# Altium footprint library FootPrintLib_1.PcbLib: 498 footprints (part 2 of 35)
Each footprint in its own frame and in the unit in brackets; x right, y up, seen from the top. Pads: shape width x height; smd on the part's side, far side on the other; paste and mask are expansions set on the pad; w line width, h text height; cw(c..) or ccw(c..) is an arc to the next point about the centre after c.
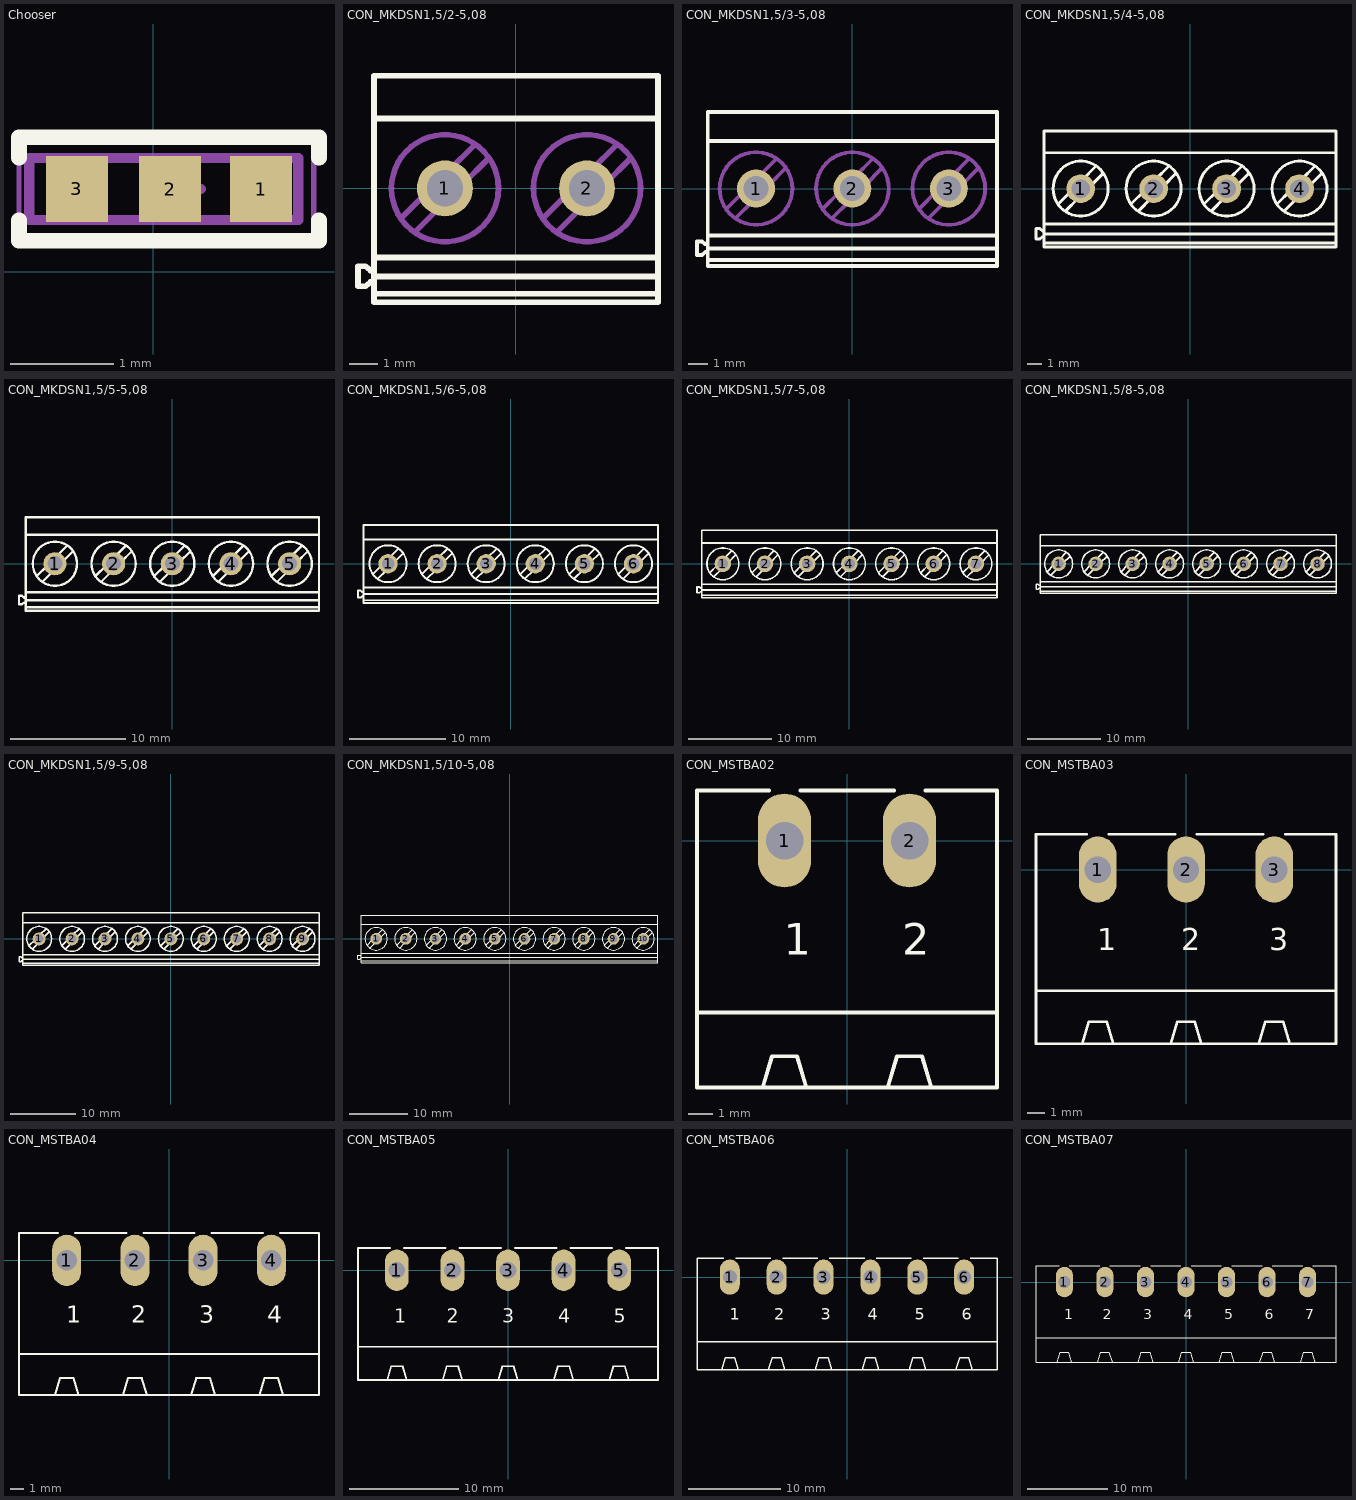
[diagram p1: the footprints below, top view; thin cyan lines are the x and y axes]

## Chooser [mm] "Connector; Header; 2 Position"
height 1.75
pads (3):
  rect 0.6x0.64 smd: 1(1.04,0.8) 2(0.16,0.8) 3(-0.74,0.8)
Top Overlay:
  lines w0.15: -1.3,0.5 -1.3,0.3 1.6,0.3 1.6,0.5 ; -1.3,1.1 -1.3,1.3 1.6,1.3 1.6,1.1
Mechanical 13:
  lines w0.1: -1.2,0.5 -1.2,1.1 1.4,1.1 1.4,0.5 -1.2,0.5
Mechanical 15:
  lines w0.05: -1.3,0.3 -1.3,1.3 1.55,1.3 1.55,0.3 -1.3,0.3
  lines w0.1: -0.06,0.8 0.46,0.8 ; 0.2,0.54 0.2,1.06
3D body "0402 cap.STEP": height 0.52, standoff 0, extent 0.1,0.538 1.1,1.062

## CON_MKDSN1,5/2-5,08 [mm]
pads (2):
  round 2 hole 1.3: 1(-2.54,0) 2(2.54,0)
Top Overlay:
  lines w0.203: -5.08,-3.775 -5.08,-3.352 ; -5.08,-3.775 5.08,-3.775 ; -5.08,-3.775 -5.08,-4.075 5.08,-4.075 5.08,-3.775 ; -5.08,-3.352 -5.209,-3.352 -5.387,-3.502 -5.65,-3.502 -5.65,-2.788 -5.387,-2.788 -5.209,-2.938 -5.08,-2.938 ; -5.08,-3.352 -5.08,-3.153 ; -5.08,-3.153 -5.08,-2.938 ; -5.08,-3.153 5.08,-3.153 ; -5.08,-2.938 -5.08,-2.473 ; -5.08,-2.473 -5.08,-1.98 -5.08,2.016 -5.08,2.499 ; -5.08,-2.473 5.08,-2.473 ; -5.08,2.499 5.08,2.499 ; -5.08,2.499 -5.08,4.025 5.08,4.025 5.08,2.499 ; 5.08,-3.775 5.08,-3.153 ; 5.08,-3.153 5.08,-2.473 ; 5.08,-2.473 5.08,-1.98 5.08,2.016 5.08,2.499
Mechanical 2:
  circle w0.203: c-2.54,0 r1.915
  circle w0.203: c2.54,0 r1.915
  lines w0.203: -4.108,-1.073 -3.179,-0.144 ; -3.613,-1.568 -2.7,-0.655 ; -1.467,1.568 -2.421,0.614 ; -0.972,1.073 -1.91,0.135 ; 0.972,-1.073 1.901,-0.144 ; 1.467,-1.568 2.38,-0.655 ; 3.613,1.568 2.659,0.614 ; 4.108,1.073 3.17,0.135 ; -3.179,-0.144 ccw(c-2.54,-0.025) -2.7,-0.655 ; -3.179,-0.144 -2.54,0.495 -2.421,0.614 ; -2.7,-0.655 -2.54,-0.495 -1.91,0.135 ; -2.421,0.614 cw(c-2.54,-0.025) -1.91,0.135 ; 1.901,-0.144 ccw(c2.54,-0.025) 2.38,-0.655 ; 1.901,-0.144 2.54,0.495 2.659,0.614 ; 2.38,-0.655 2.54,-0.495 3.17,0.135 ; 2.659,0.614 cw(c2.54,-0.025) 3.17,0.135
3D body "MKDSN2.stp": height 10.03, standoff -3.47, extent -5.643,-4.052 5.087,4.048

## CON_MKDSN1,5/3-5,08 [mm]
pads (3):
  round 2 hole 1.3: 1(-5.08,0) 2(0,0) 3(5.08,0)
Top Overlay:
  lines w0.203: -7.62,-3.775 -7.62,-3.352 ; -7.62,-3.775 7.62,-3.775 ; -7.62,-3.775 -7.62,-4.075 7.62,-4.075 7.62,-3.775 ; -7.62,-3.352 -7.749,-3.352 -7.927,-3.502 -8.19,-3.502 -8.19,-2.788 -7.927,-2.788 -7.749,-2.938 -7.62,-2.938 ; -7.62,-3.352 -7.62,-3.153 ; -7.62,-3.153 -7.62,-2.938 ; -7.62,-3.153 7.62,-3.153 ; -7.62,-2.938 -7.62,-2.473 ; -7.62,-2.473 -7.62,-1.98 -7.62,2.016 -7.62,2.499 ; -7.62,-2.473 7.62,-2.473 ; -7.62,2.499 7.62,2.499 ; -7.62,2.499 -7.62,4.025 7.62,4.025 7.62,2.499 ; 7.62,-3.775 7.62,-3.153 ; 7.62,-3.153 7.62,-2.473 ; 7.62,-2.473 7.62,-1.98 7.62,2.016 7.62,2.499
Mechanical 2:
  circle w0.203: c-5.08,0 r1.915
  circle w0.203: c0,0 r1.915
  circle w0.203: c5.08,0 r1.915
  lines w0.203: -6.648,-1.073 -5.719,-0.144 ; -6.153,-1.568 -5.24,-0.655 ; -4.007,1.568 -4.961,0.614 ; -3.512,1.073 -4.45,0.135 ; -1.568,-1.073 -0.639,-0.144 ; -1.073,-1.568 -0.16,-0.655 ; 1.073,1.568 0.119,0.614 ; 1.568,1.073 0.63,0.135 ; 3.512,-1.073 4.441,-0.144 ; 4.007,-1.568 4.92,-0.655 ; 6.153,1.568 5.199,0.614 ; 6.648,1.073 5.71,0.135 ; -5.719,-0.144 ccw(c-5.08,-0.025) -5.24,-0.655 ; -5.719,-0.144 -5.08,0.495 -4.961,0.614 ; -5.24,-0.655 -5.08,-0.495 -4.45,0.135 ; -4.961,0.614 cw(c-5.08,-0.025) -4.45,0.135 ; -0.639,-0.144 ccw(c0,-0.025) -0.16,-0.655 ; -0.639,-0.144 0,0.495 0.119,0.614 ; -0.16,-0.655 0,-0.495 0.63,0.135 ; 0.119,0.614 cw(c0,-0.025) 0.63,0.135 ; 4.441,-0.144 ccw(c5.08,-0.025) 4.92,-0.655 ; 4.441,-0.144 5.08,0.495 5.199,0.614 ; 4.92,-0.655 5.08,-0.495 5.71,0.135 ; 5.199,0.614 cw(c5.08,-0.025) 5.71,0.135
3D body "MKDSN3.stp": height 10.03, standoff -3.47, extent -8.19,-4.075 7.62,4.025

## CON_MKDSN1,5/4-5,08 [mm]
pads (4):
  round 2 hole 1.3: 1(-7.62,0) 2(-2.54,0) 3(2.54,0) 4(7.62,0)
Top Overlay:
  circle w0.203: c-7.62,0 r1.915
  circle w0.203: c-2.54,0 r1.915
  circle w0.203: c2.54,0 r1.915
  circle w0.203: c7.62,0 r1.915
  lines w0.203: -9.188,-1.073 -8.259,-0.144 ; -8.693,-1.568 -7.78,-0.655 ; -6.547,1.568 -7.501,0.614 ; -6.052,1.073 -6.99,0.135 ; -4.108,-1.073 -3.179,-0.144 ; -3.613,-1.568 -2.7,-0.655 ; -1.467,1.568 -2.421,0.614 ; -0.972,1.073 -1.91,0.135 ; 0.972,-1.073 1.901,-0.144 ; 1.467,-1.568 2.38,-0.655 ; 3.613,1.568 2.659,0.614 ; 4.108,1.073 3.17,0.135 ; 6.052,-1.073 6.981,-0.144 ; 6.547,-1.568 7.46,-0.655 ; 8.693,1.568 7.739,0.614 ; 9.188,1.073 8.25,0.135 ; -10.16,-3.775 -10.16,-3.352 ; -10.16,-3.775 10.16,-3.775 ; -10.16,-3.775 -10.16,-4.075 10.16,-4.075 10.16,-3.775 ; -10.16,-3.352 -10.289,-3.352 -10.467,-3.502 -10.73,-3.502 -10.73,-2.788 -10.467,-2.788 -10.289,-2.938 -10.16,-2.938 ; -10.16,-3.352 -10.16,-3.153 ; -10.16,-3.153 -10.16,-2.938 ; -10.16,-3.153 10.16,-3.153 ; -10.16,-2.938 -10.16,-2.473 ; -10.16,-2.473 -10.16,-1.98 -10.16,2.016 -10.16,2.499 ; -10.16,-2.473 10.16,-2.473 ; -10.16,2.499 10.16,2.499 ; -10.16,2.499 -10.16,4.025 10.16,4.025 10.16,2.499 ; -8.259,-0.144 ccw(c-7.62,-0.025) -7.78,-0.655 ; -8.259,-0.144 -7.62,0.495 -7.501,0.614 ; -7.78,-0.655 -7.62,-0.495 -6.99,0.135 ; -7.501,0.614 cw(c-7.62,-0.025) -6.99,0.135 ; -3.179,-0.144 ccw(c-2.54,-0.025) -2.7,-0.655 ; -3.179,-0.144 -2.54,0.495 -2.421,0.614 ; -2.7,-0.655 -2.54,-0.495 -1.91,0.135 ; -2.421,0.614 cw(c-2.54,-0.025) -1.91,0.135 ; 1.901,-0.144 ccw(c2.54,-0.025) 2.38,-0.655 ; 1.901,-0.144 2.54,0.495 2.659,0.614 ; 2.38,-0.655 2.54,-0.495 3.17,0.135 ; 2.659,0.614 cw(c2.54,-0.025) 3.17,0.135 ; 6.981,-0.144 ccw(c7.62,-0.025) 7.46,-0.655 ; 6.981,-0.144 7.62,0.495 7.739,0.614 ; 7.46,-0.655 7.62,-0.495 8.25,0.135 ; 7.739,0.614 cw(c7.62,-0.025) 8.25,0.135 ; 10.16,-3.775 10.16,-3.153 ; 10.16,-3.153 10.16,-2.473 ; 10.16,-2.473 10.16,-1.98 10.16,2.016 10.16,2.499
3D body "MKDSN2.stp": height 10.03, standoff -3.47, extent -10.723,-4.052 0.007,4.048
3D body "MKDSN2.stp": height 10.03, standoff -3.47, extent -0.563,-4.052 10.167,4.048

## CON_MKDSN1,5/5-5,08 [mm]
pads (5):
  round 2 hole 1.3: 1(-10.16,0) 2(-5.08,0) 3(0,0) 4(5.08,0) 5(10.16,0)
Top Overlay:
  circle w0.203: c10.16,0 r1.915
  circle w0.203: c5.08,0 r1.915
  circle w0.203: c0,0 r1.915
  circle w0.203: c-5.08,0 r1.915
  circle w0.203: c-10.16,0 r1.915
  lines w0.203: -11.728,-1.073 -10.799,-0.144 ; -11.233,-1.568 -10.32,-0.655 ; -9.087,1.568 -10.041,0.614 ; -8.592,1.073 -9.53,0.135 ; -6.648,-1.073 -5.719,-0.144 ; -6.153,-1.568 -5.24,-0.655 ; -4.007,1.568 -4.961,0.614 ; -3.512,1.073 -4.45,0.135 ; -1.568,-1.073 -0.639,-0.144 ; -1.073,-1.568 -0.16,-0.655 ; 1.073,1.568 0.119,0.614 ; 1.568,1.073 0.63,0.135 ; 3.512,-1.073 4.441,-0.144 ; 4.007,-1.568 4.92,-0.655 ; 6.153,1.568 5.199,0.614 ; 6.648,1.073 5.71,0.135 ; 8.592,-1.073 9.521,-0.144 ; 9.087,-1.568 10,-0.655 ; 11.233,1.568 10.279,0.614 ; 11.728,1.073 10.79,0.135 ; -12.7,-3.775 -12.7,-4.075 12.7,-4.075 12.7,-3.775 ; -12.7,-3.775 12.7,-3.775 ; -12.7,-3.775 -12.7,-3.352 ; -12.7,-3.352 -12.7,-3.153 ; -12.7,-3.352 -12.829,-3.352 -13.007,-3.502 -13.27,-3.502 -13.27,-2.788 -13.007,-2.788 -12.829,-2.938 -12.7,-2.938 ; -12.7,-3.153 12.7,-3.153 ; -12.7,-3.153 -12.7,-2.938 ; -12.7,-2.938 -12.7,-2.473 ; -12.7,-2.473 12.7,-2.473 ; -12.7,-2.473 -12.7,-1.98 -12.7,2.016 -12.7,2.499 ; -12.7,2.499 -12.7,4.025 12.7,4.025 12.7,2.499 ; -12.7,2.499 12.7,2.499 ; -10.799,-0.144 ccw(c-10.16,-0.025) -10.32,-0.655 ; -10.799,-0.144 -10.16,0.495 -10.041,0.614 ; -10.32,-0.655 -10.16,-0.495 -9.53,0.135 ; -10.041,0.614 cw(c-10.16,-0.025) -9.53,0.135 ; -5.719,-0.144 ccw(c-5.08,-0.025) -5.24,-0.655 ; -5.719,-0.144 -5.08,0.495 -4.961,0.614 ; -5.24,-0.655 -5.08,-0.495 -4.45,0.135 ; -4.961,0.614 cw(c-5.08,-0.025) -4.45,0.135 ; -0.639,-0.144 ccw(c0,-0.025) -0.16,-0.655 ; -0.639,-0.144 0,0.495 0.119,0.614 ; -0.16,-0.655 0,-0.495 0.63,0.135 ; 0.119,0.614 cw(c0,-0.025) 0.63,0.135 ; 4.441,-0.144 ccw(c5.08,-0.025) 4.92,-0.655 ; 4.441,-0.144 5.08,0.495 5.199,0.614 ; 4.92,-0.655 5.08,-0.495 5.71,0.135 ; 5.199,0.614 cw(c5.08,-0.025) 5.71,0.135 ; 9.521,-0.144 ccw(c10.16,-0.025) 10,-0.655 ; 9.521,-0.144 10.16,0.495 10.279,0.614 ; 10,-0.655 10.16,-0.495 10.79,0.135 ; 10.279,0.614 cw(c10.16,-0.025) 10.79,0.135 ; 12.7,-3.775 12.7,-3.153 ; 12.7,-3.153 12.7,-2.473 ; 12.7,-2.473 12.7,-1.98 12.7,2.016 12.7,2.499
3D body "MKDSN3.stp": height 10.03, standoff -3.47, extent -3.11,-4.075 12.7,4.025
3D body "MKDSN2.stp": height 10.03, standoff -3.47, extent -13.263,-4.052 -2.533,4.048

## CON_MKDSN1,5/6-5,08 [mm]
pads (6):
  round 2 hole 1.3: 1(-12.7,0) 2(-7.62,0) 3(-2.54,0) 4(2.54,0) 5(7.62,0) 6(12.7,0)
Top Overlay:
  circle w0.203: c12.7,0 r1.915
  circle w0.203: c7.62,0 r1.915
  circle w0.203: c2.54,0 r1.915
  circle w0.203: c-2.54,0 r1.915
  circle w0.203: c-7.62,0 r1.915
  circle w0.203: c-12.7,0 r1.915
  lines w0.203: -14.268,-1.073 -13.339,-0.144 ; -13.773,-1.568 -12.86,-0.655 ; -11.627,1.568 -12.581,0.614 ; -11.132,1.073 -12.07,0.135 ; -9.188,-1.073 -8.259,-0.144 ; -8.693,-1.568 -7.78,-0.655 ; -6.547,1.568 -7.501,0.614 ; -6.052,1.073 -6.99,0.135 ; -4.108,-1.073 -3.179,-0.144 ; -3.613,-1.568 -2.7,-0.655 ; -1.467,1.568 -2.421,0.614 ; -0.972,1.073 -1.91,0.135 ; 0.972,-1.073 1.901,-0.144 ; 1.467,-1.568 2.38,-0.655 ; 3.613,1.568 2.659,0.614 ; 4.108,1.073 3.17,0.135 ; 6.052,-1.073 6.981,-0.144 ; 6.547,-1.568 7.46,-0.655 ; 8.693,1.568 7.739,0.614 ; 9.188,1.073 8.25,0.135 ; 11.132,-1.073 12.061,-0.144 ; 11.627,-1.568 12.54,-0.655 ; 13.773,1.568 12.819,0.614 ; 14.268,1.073 13.33,0.135 ; -15.24,-3.775 -15.24,-4.075 15.24,-4.075 15.24,-3.775 ; -15.24,-3.775 15.24,-3.775 ; -15.24,-3.775 -15.24,-3.352 ; -15.24,-3.352 -15.24,-3.153 ; -15.24,-3.352 -15.369,-3.352 -15.547,-3.502 -15.81,-3.502 -15.81,-2.788 -15.547,-2.788 -15.369,-2.938 -15.24,-2.938 ; -15.24,-3.153 15.24,-3.153 ; -15.24,-3.153 -15.24,-2.938 ; -15.24,-2.938 -15.24,-2.473 ; -15.24,-2.473 15.24,-2.473 ; -15.24,-2.473 -15.24,-1.98 -15.24,2.016 -15.24,2.499 ; -15.24,2.499 -15.24,4.025 15.24,4.025 15.24,2.499 ; -15.24,2.499 15.24,2.499 ; -13.339,-0.144 ccw(c-12.7,-0.025) -12.86,-0.655 ; -13.339,-0.144 -12.7,0.495 -12.581,0.614 ; -12.86,-0.655 -12.7,-0.495 -12.07,0.135 ; -12.581,0.614 cw(c-12.7,-0.025) -12.07,0.135 ; -8.259,-0.144 ccw(c-7.62,-0.025) -7.78,-0.655 ; -8.259,-0.144 -7.62,0.495 -7.501,0.614 ; -7.78,-0.655 -7.62,-0.495 -6.99,0.135 ; -7.501,0.614 cw(c-7.62,-0.025) -6.99,0.135 ; -3.179,-0.144 ccw(c-2.54,-0.025) -2.7,-0.655 ; -3.179,-0.144 -2.54,0.495 -2.421,0.614 ; -2.7,-0.655 -2.54,-0.495 -1.91,0.135 ; -2.421,0.614 cw(c-2.54,-0.025) -1.91,0.135 ; 1.901,-0.144 ccw(c2.54,-0.025) 2.38,-0.655 ; 1.901,-0.144 2.54,0.495 2.659,0.614 ; 2.38,-0.655 2.54,-0.495 3.17,0.135 ; 2.659,0.614 cw(c2.54,-0.025) 3.17,0.135 ; 6.981,-0.144 ccw(c7.62,-0.025) 7.46,-0.655 ; 6.981,-0.144 7.62,0.495 7.739,0.614 ; 7.46,-0.655 7.62,-0.495 8.25,0.135 ; 7.739,0.614 cw(c7.62,-0.025) 8.25,0.135 ; 12.061,-0.144 ccw(c12.7,-0.025) 12.54,-0.655 ; 12.061,-0.144 12.7,0.495 12.819,0.614 ; 12.54,-0.655 12.7,-0.495 13.33,0.135 ; 12.819,0.614 cw(c12.7,-0.025) 13.33,0.135 ; 15.24,-3.775 15.24,-3.153 ; 15.24,-3.153 15.24,-2.473 ; 15.24,-2.473 15.24,-1.98 15.24,2.016 15.24,2.499
3D body "MKDSN3.stp": height 10.03, standoff -3.47, extent -0.57,-4.075 15.24,4.025
3D body "MKDSN3.stp": height 10.03, standoff -3.47, extent -15.81,-4.075 0,4.025

## CON_MKDSN1,5/7-5,08 [mm]
pads (7):
  round 2 hole 1.3: 1(-15.24,0) 2(-10.16,0) 3(-5.08,0) 4(0,0) 5(5.08,0) 6(10.16,0) 7(15.24,0)
Top Overlay:
  circle w0.203: c15.24,0 r1.915
  circle w0.203: c10.16,0 r1.915
  circle w0.203: c5.08,0 r1.915
  circle w0.203: c0,0 r1.915
  circle w0.203: c-5.08,0 r1.915
  circle w0.203: c-10.16,0 r1.915
  circle w0.203: c-15.24,0 r1.915
  lines w0.203: -16.808,-1.073 -15.879,-0.144 ; -16.313,-1.568 -15.4,-0.655 ; -14.167,1.568 -15.121,0.614 ; -13.672,1.073 -14.61,0.135 ; -11.728,-1.073 -10.799,-0.144 ; -11.233,-1.568 -10.32,-0.655 ; -9.087,1.568 -10.041,0.614 ; -8.592,1.073 -9.53,0.135 ; -6.648,-1.073 -5.719,-0.144 ; -6.153,-1.568 -5.24,-0.655 ; -4.007,1.568 -4.961,0.614 ; -3.512,1.073 -4.45,0.135 ; -1.568,-1.073 -0.639,-0.144 ; -1.073,-1.568 -0.16,-0.655 ; 1.073,1.568 0.119,0.614 ; 1.568,1.073 0.63,0.135 ; 3.512,-1.073 4.441,-0.144 ; 4.007,-1.568 4.92,-0.655 ; 6.153,1.568 5.199,0.614 ; 6.648,1.073 5.71,0.135 ; 8.592,-1.073 9.521,-0.144 ; 9.087,-1.568 10,-0.655 ; 11.233,1.568 10.279,0.614 ; 11.728,1.073 10.79,0.135 ; 13.672,-1.073 14.601,-0.144 ; 14.167,-1.568 15.08,-0.655 ; 16.313,1.568 15.359,0.614 ; 16.808,1.073 15.87,0.135 ; -17.78,-3.775 -17.78,-4.075 17.78,-4.075 17.78,-3.775 ; -17.78,-3.775 17.78,-3.775 ; -17.78,-3.775 -17.78,-3.352 ; -17.78,-3.352 -17.78,-3.153 ; -17.78,-3.352 -17.909,-3.352 -18.087,-3.502 -18.35,-3.502 -18.35,-2.788 -18.087,-2.788 -17.909,-2.938 -17.78,-2.938 ; -17.78,-3.153 17.78,-3.153 ; -17.78,-3.153 -17.78,-2.938 ; -17.78,-2.938 -17.78,-2.473 ; -17.78,-2.473 17.78,-2.473 ; -17.78,-2.473 -17.78,-1.98 -17.78,2.016 -17.78,2.499 ; -17.78,2.499 -17.78,4.025 17.78,4.025 17.78,2.499 ; -17.78,2.499 17.78,2.499 ; -15.879,-0.144 ccw(c-15.24,-0.025) -15.4,-0.655 ; -15.879,-0.144 -15.24,0.495 -15.121,0.614 ; -15.4,-0.655 -15.24,-0.495 -14.61,0.135 ; -15.121,0.614 cw(c-15.24,-0.025) -14.61,0.135 ; -10.799,-0.144 ccw(c-10.16,-0.025) -10.32,-0.655 ; -10.799,-0.144 -10.16,0.495 -10.041,0.614 ; -10.32,-0.655 -10.16,-0.495 -9.53,0.135 ; -10.041,0.614 cw(c-10.16,-0.025) -9.53,0.135 ; -5.719,-0.144 ccw(c-5.08,-0.025) -5.24,-0.655 ; -5.719,-0.144 -5.08,0.495 -4.961,0.614 ; -5.24,-0.655 -5.08,-0.495 -4.45,0.135 ; -4.961,0.614 cw(c-5.08,-0.025) -4.45,0.135 ; -0.639,-0.144 ccw(c0,-0.025) -0.16,-0.655 ; -0.639,-0.144 0,0.495 0.119,0.614 ; -0.16,-0.655 0,-0.495 0.63,0.135 ; 0.119,0.614 cw(c0,-0.025) 0.63,0.135 ; 4.441,-0.144 ccw(c5.08,-0.025) 4.92,-0.655 ; 4.441,-0.144 5.08,0.495 5.199,0.614 ; 4.92,-0.655 5.08,-0.495 5.71,0.135 ; 5.199,0.614 cw(c5.08,-0.025) 5.71,0.135 ; 9.521,-0.144 ccw(c10.16,-0.025) 10,-0.655 ; 9.521,-0.144 10.16,0.495 10.279,0.614 ; 10,-0.655 10.16,-0.495 10.79,0.135 ; 10.279,0.614 cw(c10.16,-0.025) 10.79,0.135 ; 14.601,-0.144 ccw(c15.24,-0.025) 15.08,-0.655 ; 14.601,-0.144 15.24,0.495 15.359,0.614 ; 15.08,-0.655 15.24,-0.495 15.87,0.135 ; 15.359,0.614 cw(c15.24,-0.025) 15.87,0.135 ; 17.78,-3.775 17.78,-3.153 ; 17.78,-3.153 17.78,-2.473 ; 17.78,-2.473 17.78,-1.98 17.78,2.016 17.78,2.499
3D body "MKDSN3.stp": height 10.03, standoff -3.47, extent 1.97,-4.075 17.78,4.025
3D body "MKDSN2.stp": height 10.03, standoff -3.47, extent -18.343,-4.052 -7.613,4.048
3D body "MKDSN2.stp": height 10.03, standoff -3.47, extent -8.183,-4.052 2.547,4.048

## CON_MKDSN1,5/8-5,08 [mm]
pads (8):
  round 2 hole 1.3: 1(-17.78,0) 2(-12.7,0) 3(-7.62,0) 4(-2.54,0) 5(2.54,0) 6(7.62,0) 7(12.7,0) 8(17.78,0)
Top Overlay:
  circle w0.203: c-17.78,0 r1.915
  circle w0.203: c-12.7,0 r1.915
  circle w0.203: c-7.62,0 r1.915
  circle w0.203: c-2.54,0 r1.915
  circle w0.203: c2.54,0 r1.915
  circle w0.203: c7.62,0 r1.915
  circle w0.203: c12.7,0 r1.915
  circle w0.203: c17.78,0 r1.915
  lines w0.203: -19.348,-1.073 -18.419,-0.144 ; -18.853,-1.568 -17.94,-0.655 ; -16.707,1.568 -17.661,0.614 ; -16.212,1.073 -17.15,0.135 ; -14.268,-1.073 -13.339,-0.144 ; -13.773,-1.568 -12.86,-0.655 ; -11.627,1.568 -12.581,0.614 ; -11.132,1.073 -12.07,0.135 ; -9.188,-1.073 -8.259,-0.144 ; -8.693,-1.568 -7.78,-0.655 ; -6.547,1.568 -7.501,0.614 ; -6.052,1.073 -6.99,0.135 ; -4.108,-1.073 -3.179,-0.144 ; -3.613,-1.568 -2.7,-0.655 ; -1.467,1.568 -2.421,0.614 ; -0.972,1.073 -1.91,0.135 ; 0.972,-1.073 1.901,-0.144 ; 1.467,-1.568 2.38,-0.655 ; 3.613,1.568 2.659,0.614 ; 4.108,1.073 3.17,0.135 ; 6.052,-1.073 6.981,-0.144 ; 6.547,-1.568 7.46,-0.655 ; 8.693,1.568 7.739,0.614 ; 9.188,1.073 8.25,0.135 ; 11.132,-1.073 12.061,-0.144 ; 11.627,-1.568 12.54,-0.655 ; 13.773,1.568 12.819,0.614 ; 14.268,1.073 13.33,0.135 ; 16.212,-1.073 17.141,-0.144 ; 16.707,-1.568 17.62,-0.655 ; 18.853,1.568 17.899,0.614 ; 19.348,1.073 18.41,0.135 ; -20.32,-3.775 -20.32,-3.352 ; -20.32,-3.775 20.32,-3.775 ; -20.32,-3.775 -20.32,-4.075 20.32,-4.075 20.32,-3.775 ; -20.32,-3.352 -20.449,-3.352 -20.627,-3.502 -20.89,-3.502 -20.89,-2.788 -20.627,-2.788 -20.449,-2.938 -20.32,-2.938 ; -20.32,-3.352 -20.32,-3.153 ; -20.32,-3.153 -20.32,-2.938 ; -20.32,-3.153 20.32,-3.153 ; -20.32,-2.938 -20.32,-2.473 ; -20.32,-2.473 -20.32,-1.98 -20.32,2.016 -20.32,2.499 ; -20.32,-2.473 20.32,-2.473 ; -20.32,2.499 20.32,2.499 ; -20.32,2.499 -20.32,4.025 20.32,4.025 20.32,2.499 ; -18.419,-0.144 ccw(c-17.78,-0.025) -17.94,-0.655 ; -18.419,-0.144 -17.78,0.495 -17.661,0.614 ; -17.94,-0.655 -17.78,-0.495 -17.15,0.135 ; -17.661,0.614 cw(c-17.78,-0.025) -17.15,0.135 ; -13.339,-0.144 ccw(c-12.7,-0.025) -12.86,-0.655 ; -13.339,-0.144 -12.7,0.495 -12.581,0.614 ; -12.86,-0.655 -12.7,-0.495 -12.07,0.135 ; -12.581,0.614 cw(c-12.7,-0.025) -12.07,0.135 ; -8.259,-0.144 ccw(c-7.62,-0.025) -7.78,-0.655 ; -8.259,-0.144 -7.62,0.495 -7.501,0.614 ; -7.78,-0.655 -7.62,-0.495 -6.99,0.135 ; -7.501,0.614 cw(c-7.62,-0.025) -6.99,0.135 ; -3.179,-0.144 ccw(c-2.54,-0.025) -2.7,-0.655 ; -3.179,-0.144 -2.54,0.495 -2.421,0.614 ; -2.7,-0.655 -2.54,-0.495 -1.91,0.135 ; -2.421,0.614 cw(c-2.54,-0.025) -1.91,0.135 ; 1.901,-0.144 ccw(c2.54,-0.025) 2.38,-0.655 ; 1.901,-0.144 2.54,0.495 2.659,0.614 ; 2.38,-0.655 2.54,-0.495 3.17,0.135 ; 2.659,0.614 cw(c2.54,-0.025) 3.17,0.135 ; 6.981,-0.144 ccw(c7.62,-0.025) 7.46,-0.655 ; 6.981,-0.144 7.62,0.495 7.739,0.614 ; 7.46,-0.655 7.62,-0.495 8.25,0.135 ; 7.739,0.614 cw(c7.62,-0.025) 8.25,0.135 ; 12.061,-0.144 ccw(c12.7,-0.025) 12.54,-0.655 ; 12.061,-0.144 12.7,0.495 12.819,0.614 ; 12.54,-0.655 12.7,-0.495 13.33,0.135 ; 12.819,0.614 cw(c12.7,-0.025) 13.33,0.135 ; 17.141,-0.144 ccw(c17.78,-0.025) 17.62,-0.655 ; 17.141,-0.144 17.78,0.495 17.899,0.614 ; 17.62,-0.655 17.78,-0.495 18.41,0.135 ; 17.899,0.614 cw(c17.78,-0.025) 18.41,0.135 ; 20.32,-3.775 20.32,-3.153 ; 20.32,-3.153 20.32,-2.473 ; 20.32,-2.473 20.32,-1.98 20.32,2.016 20.32,2.499
3D body "MKDSN3.stp": height 10.03, standoff -3.47, extent 4.51,-4.075 20.32,4.025
3D body "MKDSN3.stp": height 10.03, standoff -3.47, extent -10.73,-4.075 5.08,4.025
3D body "MKDSN2.stp": height 10.03, standoff -3.47, extent -20.883,-4.052 -10.153,4.048

## CON_MKDSN1,5/9-5,08 [mm]
pads (9):
  round 2 hole 1.3: 1(-20.32,0) 2(-15.24,0) 3(-10.16,0) 4(-5.08,0) 5(0,0) 6(5.08,0) 7(10.16,0) 8(15.24,0) 9(20.32,0)
Top Overlay:
  circle w0.203: c-20.32,0 r1.915
  circle w0.203: c-15.24,0 r1.915
  circle w0.203: c-10.16,0 r1.915
  circle w0.203: c-5.08,0 r1.915
  circle w0.203: c0,0 r1.915
  circle w0.203: c5.08,0 r1.915
  circle w0.203: c10.16,0 r1.915
  circle w0.203: c15.24,0 r1.915
  circle w0.203: c20.32,0 r1.915
  lines w0.203: -21.888,-1.073 -20.959,-0.144 ; -21.393,-1.568 -20.48,-0.655 ; -19.247,1.568 -20.201,0.614 ; -18.752,1.073 -19.69,0.135 ; -16.808,-1.073 -15.879,-0.144 ; -16.313,-1.568 -15.4,-0.655 ; -14.167,1.568 -15.121,0.614 ; -13.672,1.073 -14.61,0.135 ; -11.728,-1.073 -10.799,-0.144 ; -11.233,-1.568 -10.32,-0.655 ; -9.087,1.568 -10.041,0.614 ; -8.592,1.073 -9.53,0.135 ; -6.648,-1.073 -5.719,-0.144 ; -6.153,-1.568 -5.24,-0.655 ; -4.007,1.568 -4.961,0.614 ; -3.512,1.073 -4.45,0.135 ; -1.568,-1.073 -0.639,-0.144 ; -1.073,-1.568 -0.16,-0.655 ; 1.073,1.568 0.119,0.614 ; 1.568,1.073 0.63,0.135 ; 3.512,-1.073 4.441,-0.144 ; 4.007,-1.568 4.92,-0.655 ; 6.153,1.568 5.199,0.614 ; 6.648,1.073 5.71,0.135 ; 8.592,-1.073 9.521,-0.144 ; 9.087,-1.568 10,-0.655 ; 11.233,1.568 10.279,0.614 ; 11.728,1.073 10.79,0.135 ; 13.672,-1.073 14.601,-0.144 ; 14.167,-1.568 15.08,-0.655 ; 16.313,1.568 15.359,0.614 ; 16.808,1.073 15.87,0.135 ; 18.752,-1.073 19.681,-0.144 ; 19.247,-1.568 20.16,-0.655 ; 21.393,1.568 20.439,0.614 ; 21.888,1.073 20.95,0.135 ; -22.86,-3.775 -22.86,-3.352 ; -22.86,-3.775 22.86,-3.775 ; -22.86,-3.775 -22.86,-4.075 22.86,-4.075 22.86,-3.775 ; -22.86,-3.352 -22.989,-3.352 -23.167,-3.502 -23.43,-3.502 -23.43,-2.788 -23.167,-2.788 -22.989,-2.938 -22.86,-2.938 ; -22.86,-3.352 -22.86,-3.153 ; -22.86,-3.153 -22.86,-2.938 ; -22.86,-3.153 22.86,-3.153 ; -22.86,-2.938 -22.86,-2.473 ; -22.86,-2.473 -22.86,-1.98 -22.86,2.016 -22.86,2.499 ; -22.86,-2.473 22.86,-2.473 ; -22.86,2.499 22.86,2.499 ; -22.86,2.499 -22.86,4.025 22.86,4.025 22.86,2.499 ; -20.959,-0.144 ccw(c-20.32,-0.025) -20.48,-0.655 ; -20.959,-0.144 -20.32,0.495 -20.201,0.614 ; -20.48,-0.655 -20.32,-0.495 -19.69,0.135 ; -20.201,0.614 cw(c-20.32,-0.025) -19.69,0.135 ; -15.879,-0.144 ccw(c-15.24,-0.025) -15.4,-0.655 ; -15.879,-0.144 -15.24,0.495 -15.121,0.614 ; -15.4,-0.655 -15.24,-0.495 -14.61,0.135 ; -15.121,0.614 cw(c-15.24,-0.025) -14.61,0.135 ; -10.799,-0.144 ccw(c-10.16,-0.025) -10.32,-0.655 ; -10.799,-0.144 -10.16,0.495 -10.041,0.614 ; -10.32,-0.655 -10.16,-0.495 -9.53,0.135 ; -10.041,0.614 cw(c-10.16,-0.025) -9.53,0.135 ; -5.719,-0.144 ccw(c-5.08,-0.025) -5.24,-0.655 ; -5.719,-0.144 -5.08,0.495 -4.961,0.614 ; -5.24,-0.655 -5.08,-0.495 -4.45,0.135 ; -4.961,0.614 cw(c-5.08,-0.025) -4.45,0.135 ; -0.639,-0.144 ccw(c0,-0.025) -0.16,-0.655 ; -0.639,-0.144 0,0.495 0.119,0.614 ; -0.16,-0.655 0,-0.495 0.63,0.135 ; 0.119,0.614 cw(c0,-0.025) 0.63,0.135 ; 4.441,-0.144 ccw(c5.08,-0.025) 4.92,-0.655 ; 4.441,-0.144 5.08,0.495 5.199,0.614 ; 4.92,-0.655 5.08,-0.495 5.71,0.135 ; 5.199,0.614 cw(c5.08,-0.025) 5.71,0.135 ; 9.521,-0.144 ccw(c10.16,-0.025) 10,-0.655 ; 9.521,-0.144 10.16,0.495 10.279,0.614 ; 10,-0.655 10.16,-0.495 10.79,0.135 ; 10.279,0.614 cw(c10.16,-0.025) 10.79,0.135 ; 14.601,-0.144 ccw(c15.24,-0.025) 15.08,-0.655 ; 14.601,-0.144 15.24,0.495 15.359,0.614 ; 15.08,-0.655 15.24,-0.495 15.87,0.135 ; 15.359,0.614 cw(c15.24,-0.025) 15.87,0.135 ; 19.681,-0.144 ccw(c20.32,-0.025) 20.16,-0.655 ; 19.681,-0.144 20.32,0.495 20.439,0.614 ; 20.16,-0.655 20.32,-0.495 20.95,0.135 ; 20.439,0.614 cw(c20.32,-0.025) 20.95,0.135 ; 22.86,-3.775 22.86,-3.153 ; 22.86,-3.153 22.86,-2.473 ; 22.86,-2.473 22.86,-1.98 22.86,2.016 22.86,2.499
3D body "MKDSN3.stp": height 10.03, standoff -3.47, extent 7.05,-4.075 22.86,4.025
3D body "MKDSN3.stp": height 10.03, standoff -3.47, extent -8.19,-4.075 7.62,4.025
3D body "MKDSN3.stp": height 10.03, standoff -3.47, extent -23.43,-4.075 -7.62,4.025

## CON_MKDSN1,5/10-5,08 [mm]
pads (10):
  round 2 hole 1.3: 1(-22.86,0) 2(-17.78,0) 3(-12.7,0) 4(-7.62,0) 5(-2.54,0) 6(2.54,0) 7(7.62,0) 8(12.7,0) 9(17.78,0) 10(22.86,0)
Top Overlay:
  circle w0.203: c22.86,0 r1.915
  circle w0.203: c17.78,0 r1.915
  circle w0.203: c12.7,0 r1.915
  circle w0.203: c7.62,0 r1.915
  circle w0.203: c2.54,0 r1.915
  circle w0.203: c-2.54,0 r1.915
  circle w0.203: c-7.62,0 r1.915
  circle w0.203: c-12.7,0 r1.915
  circle w0.203: c-17.78,0 r1.915
  circle w0.203: c-22.86,0 r1.915
  lines w0.203: -24.428,-1.073 -23.499,-0.144 ; -23.933,-1.568 -23.02,-0.655 ; -21.787,1.568 -22.741,0.614 ; -21.292,1.073 -22.23,0.135 ; -19.348,-1.073 -18.419,-0.144 ; -18.853,-1.568 -17.94,-0.655 ; -16.707,1.568 -17.661,0.614 ; -16.212,1.073 -17.15,0.135 ; -14.268,-1.073 -13.339,-0.144 ; -13.773,-1.568 -12.86,-0.655 ; -11.627,1.568 -12.581,0.614 ; -11.132,1.073 -12.07,0.135 ; -9.188,-1.073 -8.259,-0.144 ; -8.693,-1.568 -7.78,-0.655 ; -6.547,1.568 -7.501,0.614 ; -6.052,1.073 -6.99,0.135 ; -4.108,-1.073 -3.179,-0.144 ; -3.613,-1.568 -2.7,-0.655 ; -1.467,1.568 -2.421,0.614 ; -0.972,1.073 -1.91,0.135 ; 0.972,-1.073 1.901,-0.144 ; 1.467,-1.568 2.38,-0.655 ; 3.613,1.568 2.659,0.614 ; 4.108,1.073 3.17,0.135 ; 6.052,-1.073 6.981,-0.144 ; 6.547,-1.568 7.46,-0.655 ; 8.693,1.568 7.739,0.614 ; 9.188,1.073 8.25,0.135 ; 11.132,-1.073 12.061,-0.144 ; 11.627,-1.568 12.54,-0.655 ; 13.773,1.568 12.819,0.614 ; 14.268,1.073 13.33,0.135 ; 16.212,-1.073 17.141,-0.144 ; 16.707,-1.568 17.62,-0.655 ; 18.853,1.568 17.899,0.614 ; 19.348,1.073 18.41,0.135 ; 21.292,-1.073 22.221,-0.144 ; 21.787,-1.568 22.7,-0.655 ; 23.933,1.568 22.979,0.614 ; 24.428,1.073 23.49,0.135 ; -25.4,-3.775 -25.4,-4.075 25.4,-4.075 25.4,-3.775 ; -25.4,-3.775 25.4,-3.775 ; -25.4,-3.775 -25.4,-3.352 ; -25.4,-3.352 -25.4,-3.153 ; -25.4,-3.352 -25.529,-3.352 -25.707,-3.502 -25.97,-3.502 -25.97,-2.788 -25.707,-2.788 -25.529,-2.938 -25.4,-2.938 ; -25.4,-3.153 25.4,-3.153 ; -25.4,-3.153 -25.4,-2.938 ; -25.4,-2.938 -25.4,-2.473 ; -25.4,-2.473 25.4,-2.473 ; -25.4,-2.473 -25.4,-1.98 -25.4,2.016 -25.4,2.499 ; -25.4,2.499 -25.4,4.025 25.4,4.025 25.4,2.499 ; -25.4,2.499 25.4,2.499 ; -23.499,-0.144 ccw(c-22.86,-0.025) -23.02,-0.655 ; -23.499,-0.144 -22.86,0.495 -22.741,0.614 ; -23.02,-0.655 -22.86,-0.495 -22.23,0.135 ; -22.741,0.614 cw(c-22.86,-0.025) -22.23,0.135 ; -18.419,-0.144 ccw(c-17.78,-0.025) -17.94,-0.655 ; -18.419,-0.144 -17.78,0.495 -17.661,0.614 ; -17.94,-0.655 -17.78,-0.495 -17.15,0.135 ; -17.661,0.614 cw(c-17.78,-0.025) -17.15,0.135 ; -13.339,-0.144 ccw(c-12.7,-0.025) -12.86,-0.655 ; -13.339,-0.144 -12.7,0.495 -12.581,0.614 ; -12.86,-0.655 -12.7,-0.495 -12.07,0.135 ; -12.581,0.614 cw(c-12.7,-0.025) -12.07,0.135 ; -8.259,-0.144 ccw(c-7.62,-0.025) -7.78,-0.655 ; -8.259,-0.144 -7.62,0.495 -7.501,0.614 ; -7.78,-0.655 -7.62,-0.495 -6.99,0.135 ; -7.501,0.614 cw(c-7.62,-0.025) -6.99,0.135 ; -3.179,-0.144 ccw(c-2.54,-0.025) -2.7,-0.655 ; -3.179,-0.144 -2.54,0.495 -2.421,0.614 ; -2.7,-0.655 -2.54,-0.495 -1.91,0.135 ; -2.421,0.614 cw(c-2.54,-0.025) -1.91,0.135 ; 1.901,-0.144 ccw(c2.54,-0.025) 2.38,-0.655 ; 1.901,-0.144 2.54,0.495 2.659,0.614 ; 2.38,-0.655 2.54,-0.495 3.17,0.135 ; 2.659,0.614 cw(c2.54,-0.025) 3.17,0.135 ; 6.981,-0.144 ccw(c7.62,-0.025) 7.46,-0.655 ; 6.981,-0.144 7.62,0.495 7.739,0.614 ; 7.46,-0.655 7.62,-0.495 8.25,0.135 ; 7.739,0.614 cw(c7.62,-0.025) 8.25,0.135 ; 12.061,-0.144 ccw(c12.7,-0.025) 12.54,-0.655 ; 12.061,-0.144 12.7,0.495 12.819,0.614 ; 12.54,-0.655 12.7,-0.495 13.33,0.135 ; 12.819,0.614 cw(c12.7,-0.025) 13.33,0.135 ; 17.141,-0.144 ccw(c17.78,-0.025) 17.62,-0.655 ; 17.141,-0.144 17.78,0.495 17.899,0.614 ; 17.62,-0.655 17.78,-0.495 18.41,0.135 ; 17.899,0.614 cw(c17.78,-0.025) 18.41,0.135 ; 22.221,-0.144 ccw(c22.86,-0.025) 22.7,-0.655 ; 22.221,-0.144 22.86,0.495 22.979,0.614 ; 22.7,-0.655 22.86,-0.495 23.49,0.135 ; 22.979,0.614 cw(c22.86,-0.025) 23.49,0.135 ; 25.4,-3.775 25.4,-3.153 ; 25.4,-3.153 25.4,-2.473 ; 25.4,-2.473 25.4,-1.98 25.4,2.016 25.4,2.499
3D body "MKDSN2.stp": height 10.03, standoff -3.47, extent -25.963,-4.052 -15.233,4.048
3D body "MKDSN3.stp": height 10.03, standoff -3.47, extent -5.65,-4.075 10.16,4.025
3D body "MKDSN3.stp": height 10.03, standoff -3.47, extent 9.59,-4.075 25.4,4.025
3D body "MKDSN2.stp": height 10.03, standoff -3.47, extent -15.803,-4.052 -5.073,4.048

## CON_MSTBA02 [mil]
height 338.58
pads (2):
  oval 85x150 hole 60: 1(-100,0) 2(100,0)
Top Overlay:
  lines w6: -125,80 -240,80 -240,-275 ; -75,80 75,80 ; 125,80 240,80 240,-275 ; -240,-275 -240,-395 -135,-395 ; -240,-275 240,-275 ; -135,-395 -65,-395 ; -135,-395 -120,-345 -80,-345 -65,-395 ; -65,-395 65,-395 ; 65,-395 135,-395 ; 65,-395 80,-345 120,-345 135,-395 ; 135,-395 240,-395 240,-275
  text "2" at 88.74,-182.48 h50
  text "1" at -101.26,-182.48 h50
3D body "MSTBA2.stp": height 339.58, standoff -136.8, extent -240,-392.44 238.74,80.09

## CON_MSTBA03 [mil]
height 338.58
pads (3):
  oval 85x150 hole 60: 1(-200,0) 2(0,0) 3(200,0)
Top Overlay:
  lines w6: -225,80 -340,80 -340,-275 ; -175,80 -25,80 ; 25,80 175,80 ; 225,80 340,80 340,-275 ; -340,-275 340,-275 ; -340,-275 -340,-395 -235,-395 ; -235,-395 -220,-345 -180,-345 -165,-395 ; -235,-395 -165,-395 ; -165,-395 -35,-395 ; -35,-395 -20,-345 20,-345 35,-395 ; -35,-395 35,-395 ; 35,-395 165,-395 ; 165,-395 235,-395 ; 165,-395 180,-345 220,-345 235,-395 ; 235,-395 340,-395 340,-275
  text "1" at -201.26,-182.48 h50
  text "2" at -11.26,-182.48 h50
  text "3" at 188.74,-182.48 h50
3D body "MSTBA3.stp": height 339.58, standoff -136.8, extent -340,-392.44 338.74,80.09

## CON_MSTBA04 [mil]
height 338.58
pads (4):
  oval 85x150 hole 60: 1(-300,0) 2(-100,0) 3(100,0) 4(300,0)
Top Overlay:
  lines w6: -325,80 -440,80 -440,-275 ; -275,80 -125,80 ; -75,80 75,80 ; 125,80 275,80 ; 325,80 440,80 440,-275 ; -440,-275 -440,-395 -335,-395 ; -440,-275 440,-275 ; -335,-395 -265,-395 ; -335,-395 -320,-345 -280,-345 -265,-395 ; -265,-395 -135,-395 ; -135,-395 -65,-395 ; -135,-395 -120,-345 -80,-345 -65,-395 ; -65,-395 65,-395 ; 65,-395 80,-345 120,-345 135,-395 ; 65,-395 135,-395 ; 135,-395 265,-395 ; 265,-395 280,-345 320,-345 335,-395 ; 265,-395 335,-395 ; 335,-395 440,-395 440,-275
  text "4" at 288.74,-182.48 h50
  text "3" at 88.74,-182.48 h50
  text "2" at -111.26,-182.48 h50
  text "1" at -301.26,-182.48 h50
3D body "MSTBA2.stp": height 339.58, standoff -136.8, extent -40,-392.44 438.74,80.09
3D body "MSTBA2.stp": height 339.58, standoff -136.8, extent -440,-392.44 38.74,80.09

## CON_MSTBA05 [mil]
height 338.58
pads (5):
  oval 85x150 hole 60: 1(-400,0) 2(-200,0) 3(0,0) 4(200,0) 5(400,0)
Top Overlay:
  lines w6: -425,80 -540,80 -540,-275 ; -375,80 -225,80 ; -175,80 -25,80 ; 25,80 175,80 ; 225,80 375,80 ; 425,80 540,80 540,-275 ; -540,-275 540,-275 ; -540,-275 -540,-395 -435,-395 ; -435,-395 -420,-345 -380,-345 -365,-395 ; -435,-395 -365,-395 ; -365,-395 -235,-395 ; -235,-395 -220,-345 -180,-345 -165,-395 ; -235,-395 -165,-395 ; -165,-395 -35,-395 ; -35,-395 35,-395 ; -35,-395 -20,-345 20,-345 35,-395 ; 35,-395 165,-395 ; 165,-395 235,-395 ; 165,-395 180,-345 220,-345 235,-395 ; 235,-395 365,-395 ; 365,-395 435,-395 ; 365,-395 380,-345 420,-345 435,-395 ; 435,-395 540,-395 540,-275
  text "5" at 380,-189.37 h50
  text "4" at 180,-189.37 h50
  text "3" at -20,-189.37 h50
  text "2" at -220,-189.37 h50
  text "1" at -410,-189.37 h50
3D body "MSTBA2.stp": height 339.58, standoff -136.8, extent -540,-392.44 -61.26,80.09
3D body "MSTBA3.stp": height 339.58, standoff -136.8, extent -140,-392.44 538.74,80.09

## CON_MSTBA06 [mil]
height 338.58
pads (6):
  oval 85x150 hole 60: 1(-500,0) 2(-300,0) 3(-100,0) 4(100,0) 5(300,0) 6(500,0)
Top Overlay:
  lines w6: -525,80 -640,80 -640,-275 ; -475,80 -325,80 ; -275,80 -125,80 ; -75,80 75,80 ; 125,80 275,80 ; 325,80 475,80 ; 525,80 640,80 640,-275 ; -640,-275 -640,-395 -535,-395 ; -640,-275 640,-275 ; -535,-395 -465,-395 ; -535,-395 -520,-345 -480,-345 -465,-395 ; -465,-395 -335,-395 ; -335,-395 -265,-395 ; -335,-395 -320,-345 -280,-345 -265,-395 ; -265,-395 -135,-395 ; -135,-395 -120,-345 -80,-345 -65,-395 ; -135,-395 -65,-395 ; -65,-395 65,-395 ; 65,-395 80,-345 120,-345 135,-395 ; 65,-395 135,-395 ; 135,-395 265,-395 ; 265,-395 280,-345 320,-345 335,-395 ; 265,-395 335,-395 ; 335,-395 465,-395 ; 465,-395 480,-345 520,-345 535,-395 ; 465,-395 535,-395 ; 535,-395 640,-395 640,-275
  text "6" at 488.74,-182.48 h50
  text "5" at 288.74,-182.48 h50
  text "4" at 88.74,-182.48 h50
  text "3" at -111.26,-182.48 h50
  text "2" at -311.26,-182.48 h50
  text "1" at -501.26,-182.48 h50
3D body "MSTBA3.stp": height 339.58, standoff -136.8, extent -640,-392.44 38.74,80.09
3D body "MSTBA3.stp": height 339.58, standoff -136.8, extent -40,-392.44 638.74,80.09

## CON_MSTBA07 [mil]
height 338.58
pads (7):
  oval 85x150 hole 60: 1(-600,0) 2(-400,0) 3(-200,0) 4(0,0) 5(200,0) 6(400,0) 7(600,0)
Top Overlay:
  lines w6: -625,80 -740,80 -740,-275 ; -575,80 -425,80 ; -375,80 -225,80 ; -175,80 -25,80 ; 25,80 175,80 ; 225,80 375,80 ; 425,80 575,80 ; 625,80 740,80 740,-275 ; -740,-275 -740,-395 -635,-395 ; -740,-275 740,-275 ; -635,-395 -565,-395 ; -635,-395 -620,-345 -580,-345 -565,-395 ; -565,-395 -435,-395 ; -435,-395 -365,-395 ; -435,-395 -420,-345 -380,-345 -365,-395 ; -365,-395 -235,-395 ; -235,-395 -220,-345 -180,-345 -165,-395 ; -235,-395 -165,-395 ; -165,-395 -35,-395 ; -35,-395 -20,-345 20,-345 35,-395 ; -35,-395 35,-395 ; 35,-395 165,-395 ; 165,-395 180,-345 220,-345 235,-395 ; 165,-395 235,-395 ; 235,-395 365,-395 ; 365,-395 380,-345 420,-345 435,-395 ; 365,-395 435,-395 ; 435,-395 565,-395 ; 565,-395 580,-345 620,-345 635,-395 ; 565,-395 635,-395 ; 635,-395 740,-395 740,-275
  text "7" at 588.74,-182.48 h50
  text "6" at 388.74,-182.48 h50
  text "5" at 188.74,-182.48 h50
  text "4" at -11.26,-182.48 h50
  text "3" at -211.26,-182.48 h50
  text "2" at -411.26,-182.48 h50
  text "1" at -601.26,-182.48 h50
3D body "MSTBA2.stp": height 339.58, standoff -136.8, extent -340,-392.44 138.74,80.09
3D body "MSTBA2.stp": height 339.58, standoff -136.8, extent -740,-392.44 -261.26,80.09
3D body "MSTBA3.stp": height 339.58, standoff -136.8, extent 60,-392.44 738.74,80.09